# Altium integrated library TAJB106K016RNJ.IntLib: 1 symbol
Pins are listed as number, name and electrical type; pins without a type are passive.

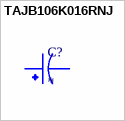
[diagram p0: symbol TAJB106K016RNJ]

## TAJB106K016RNJ
designator C?
Cap Tant Solid 10uF 16V B CASE 10% (3.5 X 2.8 X 1.9mm) Inward L SMD 3528-21 2.8 Ohm 125Â°C T/R; MF: KYOCERA AVX; MP: TAJB106K016RNJ; SnapEDA_Link: https://www.snapeda.com/parts/TAJB106K016RNJ/Kyocera/view-part/?ref=snap; Package: Package; Value: *; Check_prices: https://www.snapeda.com/parts/TAJB106K016RNJ/Kyocera/view-part/?ref=eda
footprint CAPPM3528X210N
pins: 1, 2